# Altium footprint library Footprint-Lib-PhilsLab.PcbLib: 544 footprints (part 19 of 34)
Each footprint in its own frame and in the unit in brackets; x right, y up, seen from the top. Pads: shape width x height; smd on the part's side, far side on the other; paste and mask are expansions set on the pad; w line width, h text height; cw(c..) or ccw(c..) is an arc to the next point about the centre after c.
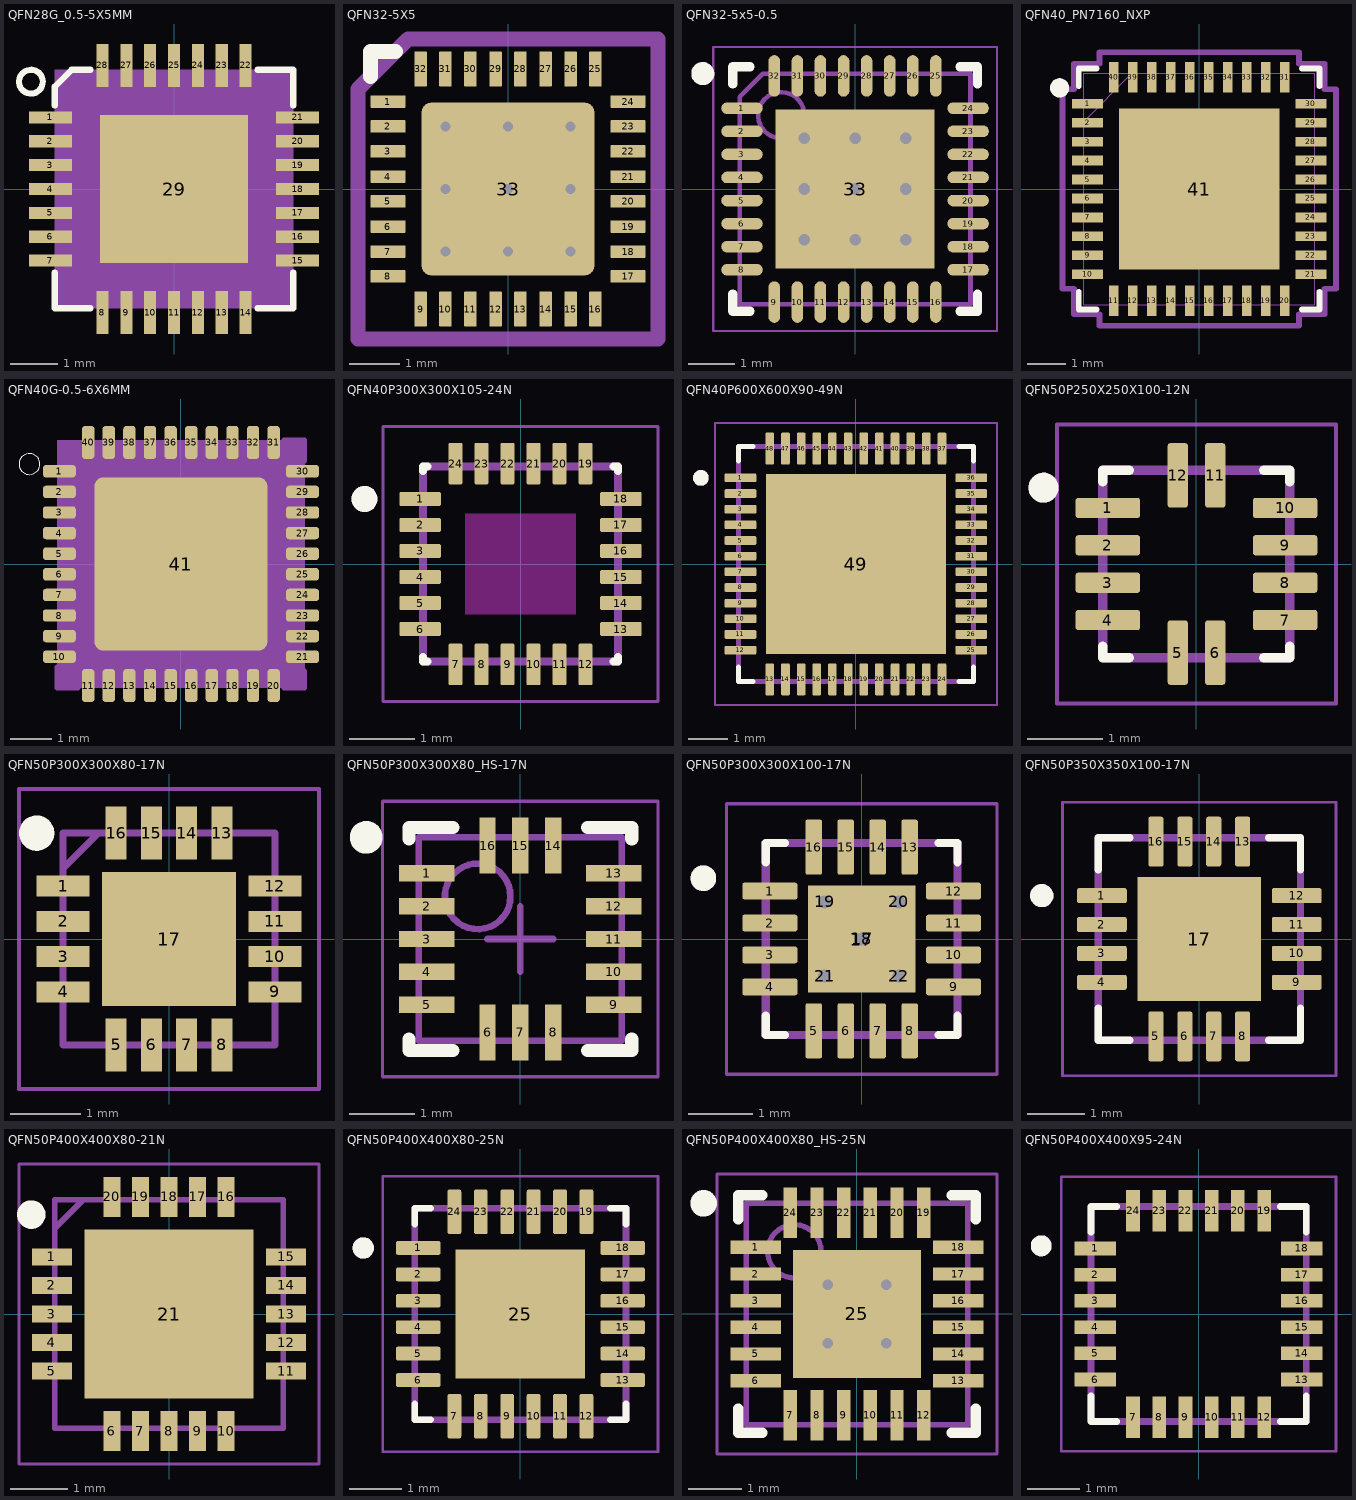
[diagram p18: the footprints below, top view; thin cyan lines are the x and y axes]

## QFN28G_0.5-5X5MM [mm]
pads (29):
  rect 0.9x0.254 smd: 1(-2.59,1.5) 2(-2.59,1) 3(-2.59,0.5) 4(-2.59,0) 5(-2.59,-0.5) 6(-2.59,-1) 7(-2.59,-1.5) 15(2.59,-1.5) 16(2.59,-1) 17(2.59,-0.5) 18(2.59,0) 19(2.59,0.5) 20(2.59,1) 21(2.59,1.5)
  rect 0.254x0.9 smd: 8(-1.5,-2.59) 9(-1,-2.59) 10(-0.5,-2.59) 11(0,-2.59) 12(0.5,-2.59) 13(1,-2.59) 14(1.5,-2.59) 22(1.5,2.59) 23(1,2.59) 24(0.5,2.59) 25(0,2.59) 26(-0.5,2.59) 27(-1,2.59) 28(-1.5,2.59)
  rect 3.1x3.1 smd paste-3: 29(0,0)
Top Overlay:
  circle w0.127: c-3,2.25 r0.25
  lines w0.127: -2.5,-1.75 -2.5,-2.5 -1.75,-2.5 ; -2.5,1.75 -2.5,2.146 -2.146,2.5 -1.75,2.5 ; 1.75,-2.5 2.5,-2.5 2.5,-1.75 ; 1.75,2.5 2.5,2.5 2.5,1.75
Top Paste:
  region: 1.5,-1.5 0.25,-1.5 0.25,-0.25 1.5,-0.25
  region: -0.25,-1.503 -1.503,-1.503 -1.503,-0.25 -0.25,-0.25
  region: 1.5,0.25 0.25,0.25 0.25,1.5 1.5,1.5
  region: -0.25,0.25 -1.503,0.25 -1.503,1.5 -0.25,1.5
Mechanical 15:
  region: 2.5,-2.501 -2.501,-2.501 -2.501,2.5 2.5,2.5

## QFN32-5X5 [mm]
pads (33):
  rrect10% 0.7x0.25 smd mask+0.05: 1(-2.4,1.75) 2(-2.4,1.25) 3(-2.4,0.75) 4(-2.4,0.25) 5(-2.4,-0.25) 6(-2.4,-0.75) 7(-2.4,-1.25) 8(-2.4,-1.75) 17(2.4,-1.75) 18(2.4,-1.25) 19(2.4,-0.75) 20(2.4,-0.25) 21(2.4,0.25) 22(2.4,0.75) 23(2.4,1.25) 24(2.4,1.75)
  rrect10% 0.25x0.7 smd mask+0.05: 9(-1.75,-2.4) 10(-1.25,-2.4) 11(-0.75,-2.4) 12(-0.25,-2.4) 13(0.25,-2.4) 14(0.75,-2.4) 15(1.25,-2.4) 16(1.75,-2.4) 25(1.75,2.4) 26(1.25,2.4) 27(0.75,2.4) 28(0.25,2.4) 29(-0.25,2.4) 30(-0.75,2.4) 31(-1.25,2.4) 32(-1.75,2.4)
  rrect10% 3.45x3.45 smd mask+0.07: 33(0,0)
via 0,0 diameter 0.65 hole 0.2
via 0,1.25 diameter 0.65 hole 0.2
via 0,-1.25 diameter 0.65 hole 0.2
via -1.25,-1.25 diameter 0.65 hole 0.2
via -1.25,0 diameter 0.65 hole 0.2
via -1.25,1.25 diameter 0.65 hole 0.2
via 1.25,1.25 diameter 0.65 hole 0.2
via 1.25,0 diameter 0.65 hole 0.2
via 1.25,-1.25 diameter 0.65 hole 0.2
Top Overlay:
  lines w0.3: -2.75,2.25 -2.75,2.75 -2.25,2.75
Mechanical 13:
  lines w0.3: -3,-3 -3,-1.75 -3,2 -2,3 3,3 3,-3 -3,-3
  text "'.Designator'" at -5.84,-0.925 h1
3D body "QFN32-5x5.step": height 0.85, standoff 0, extent -2.5,-2.5 2.5,2.5

## QFN32-5x5-0.5 [mm]
height 1
pads (33):
  oval 0.9x0.25 smd mask+0.05: 1(-2.45,1.75) 2(-2.45,1.25) 3(-2.45,0.75) 4(-2.45,0.25) 5(-2.45,-0.25) 6(-2.45,-0.75) 7(-2.45,-1.25) 8(-2.45,-1.75) 17(2.45,-1.75) 18(2.45,-1.25) 19(2.45,-0.75) 20(2.45,-0.25) 21(2.45,0.25) 22(2.45,0.75) 23(2.45,1.25) 24(2.45,1.75)
  oval 0.25x0.9 smd mask+0.05: 9(-1.75,-2.45) 10(-1.25,-2.45) 11(-0.75,-2.45) 12(-0.25,-2.45) 13(0.25,-2.45) 14(0.75,-2.45) 15(1.25,-2.45) 16(1.75,-2.45) 25(1.75,2.45) 26(1.25,2.45) 27(0.75,2.45) 28(0.25,2.45) 29(-0.25,2.45) 30(-0.75,2.45) 31(-1.25,2.45) 32(-1.75,2.45)
  rect 3.45x3.45 smd mask+0.05: 33(0,0)
via -1.1,1.1 diameter 0.6 hole 0.25
via 0,1.1 diameter 0.6 hole 0.25
via 1.1,1.1 diameter 0.6 hole 0.25
via -1.1,0 diameter 0.6 hole 0.25
via 0,0 diameter 0.6 hole 0.25
via 1.1,0 diameter 0.6 hole 0.25
via -1.1,-1.1 diameter 0.6 hole 0.25
via 0,-1.1 diameter 0.6 hole 0.25
via 1.1,-1.1 diameter 0.6 hole 0.25
Top Overlay:
  circle w0.25: c-3.3,2.5 r0.125
  lines w0.2: -2.65,-2.275 -2.65,-2.65 -2.275,-2.65 ; -2.65,2.275 -2.65,2.65 -2.275,2.65 ; 2.275,-2.65 2.65,-2.65 2.65,-2.275 ; 2.275,2.65 2.65,2.65 2.65,2.275
Mechanical 13:
  circle w0.1: c-1.6,1.6 r0.5
  lines w0.1: -2.5,-2.5 -2.5,2 -2,2.5 2.5,2.5 2.5,-2.5 -2.5,-2.5
  text "'.Designator'" at -6.315,-1.4 h1
Mechanical 15:
  lines w0.05: -3.075,-3.075 -3.075,3.075 3.075,3.075 3.075,-3.075 -3.075,-3.075
  lines w0.1: -0.5,0 0.5,0 ; 0,-0.5 0,0.5
3D body "QFN32-5x5-0.5.step": height 1, standoff 0, extent -2.501,-2.501 2.501,2.501

## QFN40_PN7160_NXP [mil]
pads (41):
  rect 32x10 smd paste+0 mask+0: 1(-116,88.61) 2(-116,68.92) 3(-116,49.23) 4(-116,29.54) 5(-116,9.85) 6(-116,-9.85) 7(-116,-29.54) 8(-116,-49.23) 9(-116,-68.92) 10(-116,-88.61) 21(116,-88.61) 22(116,-68.92) 23(116,-49.23) 24(116,-29.54) 25(116,-9.85) 26(116,9.85) 27(116,29.54) 28(116,49.23) 29(116,68.92) 30(116,88.61)
  rect 10x32 smd paste+0 mask+0: 11(-88.61,-116) 12(-68.92,-116) 13(-49.23,-116) 14(-29.54,-116) 15(-9.85,-116) 16(9.85,-116) 17(29.54,-116) 18(49.23,-116) 19(68.92,-116) 20(88.61,-116) 31(88.61,116) 32(68.92,116) 33(49.23,116) 34(29.54,116) 35(9.85,116) 36(-9.85,116) 37(-29.54,116) 38(-49.23,116) 39(-68.92,116) 40(-88.61,116)
  rect 167x167 smd paste-83.5 mask+0: 41(0,0)
Top Overlay:
  circle w10: c-145,105 r5
  lines w6: -125,-106.7 -125,-125 -106.7,-125 ; -125,106.7 -125,125 -106.7,125 ; 106.7,-125 125,-125 125,-106.7 ; 106.7,125 125,125 125,106.7
Top Paste:
  region: -31.77,79.56 -79.56,79.56 -79.56,31.77 -31.77,31.77
  region: -31.77,23.9 -79.56,23.9 -79.56,-23.9 -31.77,-23.9
  region: -31.77,-31.77 -79.56,-31.77 -79.56,-79.56 -31.77,-79.56
  region: 23.9,79.56 -23.9,79.56 -23.9,31.77 23.9,31.77
  region: 23.9,23.9 -23.9,23.9 -23.9,-23.9 23.9,-23.9
  region: 23.9,-31.77 -23.9,-31.77 -23.9,-79.56 23.9,-79.56
  region: 79.56,79.56 31.77,79.56 31.77,31.77 79.56,31.77
  region: 79.56,23.9 31.77,23.9 31.77,-23.9 79.56,-23.9
  region: 79.56,-31.77 31.77,-31.77 31.77,-79.56 79.56,-79.56
Mechanical 13:
  lines w1: -120,70 -70,120 ; -120,-120 120,-120 120,120 -120,120 -120,-120 ; -120,-94.61 -120,-82.61 -120,-94.61 ; -120,-74.92 -120,-62.91 -120,-74.92 ; -120,-55.23 -120,-43.23 -120,-55.23 ; -120,-35.53 -120,-23.54 -120,-35.53 ; -120,-15.85 -120,-3.85 -120,-15.85 ; -120,3.85 -120,15.85 -120,3.85 ; -120,23.54 -120,35.53 -120,23.54 ; -120,43.23 -120,55.23 -120,43.23 ; -120,62.91 -120,74.92 -120,62.91 ; -120,82.61 -120,94.61 -120,82.61 ; -94.61,-120 -82.61,-120 -94.61,-120 ; -94.61,120 -82.61,120 -94.61,120 ; -74.92,-120 -62.91,-120 -74.92,-120 ; -74.92,120 -62.91,120 -74.92,120 ; -55.23,-120 -43.23,-120 -55.23,-120 ; -55.23,120 -43.23,120 -55.23,120 ; -35.53,-120 -23.54,-120 -35.53,-120 ; -35.53,120 -23.54,120 -35.53,120 ; -15.85,-120 -3.85,-120 -15.85,-120 ; -15.85,120 -3.85,120 -15.85,120 ; 3.85,-120 15.85,-120 3.85,-120 ; 3.85,120 15.85,120 3.85,120 ; 23.54,-120 35.53,-120 23.54,-120 ; 23.54,120 35.53,120 23.54,120 ; 43.23,-120 55.23,-120 43.23,-120 ; 43.23,120 55.23,120 43.23,120 ; 62.91,-120 74.92,-120 62.91,-120 ; 62.91,120 74.92,120 62.91,120 ; 82.61,-120 94.61,-120 82.61,-120 ; 82.61,120 94.61,120 82.61,120 ; 120,-94.61 120,-82.61 120,-94.61 ; 120,-74.92 120,-62.91 120,-74.92 ; 120,-55.23 120,-43.23 120,-55.23 ; 120,-35.53 120,-23.54 120,-35.53 ; 120,-15.85 120,-3.85 120,-15.85 ; 120,3.85 120,15.85 120,3.85 ; 120,23.54 120,35.53 120,23.54 ; 120,43.23 120,55.23 120,43.23 ; 120,62.91 120,74.92 120,62.91 ; 120,82.61 120,94.61 120,82.61
  text "*" at -112.5,73.45 h50
Mechanical 15:
  lines w6: -142,-103.61 -130,-103.61 -130,-130 -103.61,-130 -103.61,-142 103.61,-142 103.61,-130 130,-130 130,-103.61 142,-103.61 142,103.61 130,103.61 130,130 103.61,130 103.61,142 -103.61,142 -103.61,130 -130,130 -130,103.61 -142,103.61 -142,-103.61
3D body "QFN40_PN7160_NXP.step": height 39.09, standoff 0, extent -120,-120 120,120

## QFN40G-0.5-6X6MM [mm]
pads (41):
  rrect50% 0.8x0.3 smd: 1(-2.95,2.25) 2(-2.95,1.75) 3(-2.95,1.25) 4(-2.95,0.75) 5(-2.95,0.25) 6(-2.95,-0.25) 7(-2.95,-0.75) 8(-2.95,-1.25) 9(-2.95,-1.75) 10(-2.95,-2.25) 21(2.95,-2.25) 22(2.95,-1.75) 23(2.95,-1.25) 24(2.95,-0.75) 25(2.95,-0.25) 26(2.95,0.25) 27(2.95,0.75) 28(2.95,1.25) 29(2.95,1.75) 30(2.95,2.25)
  rrect50% 0.3x0.8 smd: 11(-2.25,-2.95) 12(-1.75,-2.95) 13(-1.25,-2.95) 14(-0.75,-2.95) 15(-0.25,-2.95) 16(0.25,-2.95) 17(0.75,-2.95) 18(1.25,-2.95) 19(1.75,-2.95) 20(2.25,-2.95) 31(2.25,2.95) 32(1.75,2.95) 33(1.25,2.95) 34(0.75,2.95) 35(0.25,2.95) 36(-0.25,2.95) 37(-0.75,2.95) 38(-1.25,2.95) 39(-1.75,2.95) 40(-2.25,2.95)
  rrect10% 4.2x4.2 smd: 41(0,0)
Top Overlay:
  circle w0: c-3.675,2.425 r0.254
Mechanical 13:
  lines w0.127: -3,-2.5 -3,-3 -2.5,-3 ; 2.5,-3 3,-3 3,-2.6 ; 2.5,3 3,3 3,2.5
Mechanical 15:
  region: 3,-3 -3,-3 -3,3 3,3
3D body "step_temp.STEP": height 1, standoff 0, extent -3,-3 3,3

## QFN40P300X300X105-24N [mm]
height 1.05
pads (24):
  rrect25% 0.64x0.22 smd: 1(-1.545,1) 2(-1.545,0.6) 3(-1.545,0.2) 4(-1.545,-0.2) 5(-1.545,-0.6) 6(-1.545,-1) 13(1.545,-1) 14(1.545,-0.6) 15(1.545,-0.2) 16(1.545,0.2) 17(1.545,0.6) 18(1.545,1)
  rrect25% 0.22x0.64 smd: 7(-1,-1.545) 8(-0.6,-1.545) 9(-0.2,-1.545) 10(0.2,-1.545) 11(0.6,-1.545) 12(1,-1.545) 19(1,1.545) 20(0.6,1.545) 21(0.2,1.545) 22(-0.2,1.545) 23(-0.6,1.545) 24(-1,1.545)
Top Overlay:
  circle w0.2: c-2.4,1 r0.1
  lines w0.127: -1.5,-1.43 -1.5,-1.5 -1.43,-1.5 ; -1.5,1.43 -1.5,1.5 -1.43,1.5 ; 1.43,-1.5 1.5,-1.5 1.5,-1.43 ; 1.43,1.5 1.5,1.5 1.5,1.43
Keep-Out Layer:
  region: 0.85,-0.77 -0.85,-0.77 -0.85,0.77 0.85,0.77
Mechanical 13:
  circle w0.2: c-2.4,1 r0.1
  lines w0.127: -1.5,-1.5 1.5,-1.5 1.5,1.5 -1.5,1.5 -1.5,-1.5
Mechanical 15:
  lines w0.05: -2.115,-2.115 2.115,-2.115 2.115,2.115 -2.115,2.115 -2.115,-2.115
3D body "step_temp.STEP": height 1, standoff -0.05, extent -1.5,-1.5 1.5,1.5

## QFN40P600X600X90-49N [mm]
height 0.9
pads (49):
  rrect25% 0.81x0.22 smd: 1(-2.95,2.2) 2(-2.95,1.8) 3(-2.95,1.4) 4(-2.95,1) 5(-2.95,0.6) 6(-2.95,0.2) 7(-2.95,-0.2) 8(-2.95,-0.6) 9(-2.95,-1) 10(-2.95,-1.4) 11(-2.95,-1.8) 12(-2.95,-2.2) 25(2.95,-2.2) 26(2.95,-1.8) 27(2.95,-1.4) 28(2.95,-1) 29(2.95,-0.6) 30(2.95,-0.2) 31(2.95,0.2) 32(2.95,0.6) 33(2.95,1) 34(2.95,1.4) 35(2.95,1.8) 36(2.95,2.2)
  rrect25% 0.22x0.81 smd: 13(-2.2,-2.95) 14(-1.8,-2.95) 15(-1.4,-2.95) 16(-1,-2.95) 17(-0.6,-2.95) 18(-0.2,-2.95) 19(0.2,-2.95) 20(0.6,-2.95) 21(1,-2.95) 22(1.4,-2.95) 23(1.8,-2.95) 24(2.2,-2.95) 37(2.2,2.95) 38(1.8,2.95) 39(1.4,2.95) 40(1,2.95) 41(0.6,2.95) 42(0.2,2.95) 43(-0.2,2.95) 44(-0.6,2.95) 45(-1,2.95) 46(-1.4,2.95) 47(-1.8,2.95) 48(-2.2,2.95)
  rect 4.6x4.6 smd paste-3: 49(0,0)
Top Overlay:
  circle w0.2: c-3.96,2.2 r0.1
  lines w0.127: -3,-2.63 -3,-3 -2.63,-3 ; -3,2.63 -3,3 -2.63,3 ; 2.63,-3 3,-3 3,-2.63 ; 2.63,3 3,3 3,2.63
Top Paste:
  region: -0.42,0.42 -1.88,0.42 -1.88,1.88 -0.42,1.88
  region: 1.88,0.42 0.42,0.42 0.42,1.88 1.88,1.88
  region: -0.42,-1.88 -1.88,-1.88 -1.88,-0.42 -0.42,-0.42
  region: 1.88,-1.88 0.42,-1.88 0.42,-0.42 1.88,-0.42
Mechanical 13:
  circle w0.2: c-3.96,2.2 r0.1
  lines w0.127: -3,-3 3,-3 3,3 -3,3 -3,-3
Mechanical 15:
  lines w0.05: -3.605,-3.605 3.605,-3.605 3.605,3.605 -3.605,3.605 -3.605,-3.605
3D body "step_temp.STEP": height 0.95, standoff 0, extent -3,-3 3,3

## QFN50P250X250X100-12N [mm]
pads (12):
  rrect25% 0.86x0.27 smd: 1(-1.185,0.75) 2(-1.185,0.25) 3(-1.185,-0.25) 4(-1.185,-0.75) 7(1.185,-0.75) 8(1.185,-0.25) 9(1.185,0.25) 10(1.185,0.75)
  rrect25% 0.27x0.86 smd: 5(-0.25,-1.185) 6(0.25,-1.185) 11(0.25,1.185) 12(-0.25,1.185)
Top Overlay:
  circle w0.2: c-2.045,1.02 r0.1
  lines w0.127: -1.25,-1.1 -1.25,-1.25 -0.9,-1.25 ; -1.25,1.1 -1.25,1.25 -0.9,1.25 ; 0.9,-1.25 1.25,-1.25 1.25,-1.1 ; 0.9,1.25 1.25,1.25 1.25,1.1
Mechanical 13:
  circle w0.2: c-2.045,1.02 r0.1
  lines w0.127: -1.25,-1.25 1.25,-1.25 1.25,1.25 -1.25,1.25 -1.25,-1.25
Mechanical 15:
  lines w0.05: -1.865,-1.865 1.865,-1.865 1.865,1.865 -1.865,1.865 -1.865,-1.865
3D body "TPS63051RMWR--3DModel-STEP-269445.STEP": height 1, standoff 0, extent -1.25,-1.25 1.25,1.25

## QFN50P300X300X80-17N [mm]
pads (17):
  rect 0.75x0.3 smd: 1(-1.5,0.75) 2(-1.5,0.25) 3(-1.5,-0.25) 4(-1.5,-0.75) 9(1.5,-0.75) 10(1.5,-0.25) 11(1.5,0.25) 12(1.5,0.75)
  rect 0.3x0.75 smd: 5(-0.75,-1.5) 6(-0.25,-1.5) 7(0.25,-1.5) 8(0.75,-1.5) 13(0.75,1.5) 14(0.25,1.5) 15(-0.25,1.5) 16(-0.75,1.5)
  rect 1.9x1.9 smd: 17(0,0)
Top Overlay:
  circle w0.25: c-1.875,1.5 r0.125
Mechanical 13:
  lines w0.1: -1.5,1 -1,1.5 ; -1.5,-1.5 -1.5,1.5 1.5,1.5 1.5,-1.5 -1.5,-1.5
  text "'.Designator'" at -6.315,-1.4 h1
Mechanical 15:
  lines w0.05: -2.125,-2.125 -2.125,2.125 2.125,2.125 2.125,-2.125 -2.125,-2.125
3D body "MAX25202SATEA_VY+.stp": height 0.8, standoff 0, extent -1.55,-1.55 1.55,1.55

## QFN50P300X300X80_HS-17N [mm] "QFN, 16-Leads, Body 3.00x3.00mm, Pitch 0.50mm, Thermal Pad 1.00x1.00mm, IPC Medium Density"
height 0.8
pads (16):
  rect 0.85x0.25 smd mask+0.05: 1(-1.425,1) 2(-1.425,0.5) 3(-1.425,0) 4(-1.425,-0.5) 5(-1.425,-1) 9(1.425,-1) 10(1.425,-0.5) 11(1.425,0) 12(1.425,0.5) 13(1.425,1)
  rect 0.25x0.85 smd mask+0.05: 6(-0.5,-1.425) 7(0,-1.425) 8(0.5,-1.425) 14(0.5,1.425) 15(0,1.425) 16(-0.5,1.425)
Top Overlay:
  circle w0.25: c-2.35,1.55 r0.125
  lines w0.2: -1.7,-1.525 -1.7,-1.7 -1.025,-1.7 ; -1.7,1.525 -1.7,1.7 -1.025,1.7 ; 1.025,-1.7 1.7,-1.7 1.7,-1.525 ; 1.025,1.7 1.7,1.7 1.7,1.525
Mechanical 13:
  circle w0.1: c-0.65,0.65 r0.5
  lines w0.1: -1.55,-1.55 1.55,-1.55 1.55,1.55 -1.55,1.55 -1.55,-1.55
  text "'.Designator'" at -5.84,-0.925 h1
Mechanical 15:
  lines w0.05: -2.1,-2.1 2.1,-2.1 2.1,2.1 -2.1,2.1 -2.1,-2.1
  lines w0.1: -0.5,0 0.5,0 ; 0,-0.5 0,0.5
3D body "IAM-20380.STEP": height 0.81, standoff 0.01, extent -1.5,-1.5 1.5,1.5

## QFN50P300X300X100-17N [mm]
pads (22):
  rrect25% 0.86x0.26 smd: 1(-1.435,0.75) 2(-1.435,0.25) 3(-1.435,-0.25) 4(-1.435,-0.75) 9(1.435,-0.75) 10(1.435,-0.25) 11(1.435,0.25) 12(1.435,0.75)
  rrect25% 0.26x0.86 smd: 5(-0.75,-1.435) 6(-0.25,-1.435) 7(0.25,-1.435) 8(0.75,-1.435) 13(0.75,1.435) 14(0.25,1.435) 15(-0.25,1.435) 16(-0.75,1.435)
  rect 1.68x1.68 smd paste-0.31: 17(0,0)
  round 0.4 hole 0.2 mask+0: 18(0,0) 19(-0.58,0.58) 20(0.58,0.58) 21(-0.58,-0.58) 22(0.58,-0.58)
Top Overlay:
  circle w0.2: c-2.475,0.95 r0.1
  lines w0.127: -1.5,-1.2 -1.5,-1.5 -1.2,-1.5 ; -1.5,1.2 -1.5,1.5 -1.2,1.5 ; 1.2,-1.5 1.5,-1.5 1.5,-1.2 ; 1.2,1.5 1.5,1.5 1.5,1.2
Mechanical 13:
  circle w0.2: c-2.475,0.95 r0.1
  lines w0.127: -1.5,-1.5 -1.5,1.5 1.5,1.5 1.5,-1.5 -1.5,-1.5
Mechanical 15:
  lines w0.05: -2.115,-2.115 -2.115,2.115 2.115,2.115 2.115,-2.115 -2.115,-2.115
3D body "step_temp.STEP": height 1, standoff 0, extent -1.5,-1.5 1.5,1.5

## QFN50P350X350X100-17N [mm]
pads (17):
  rrect25% 0.86x0.26 smd: 1(-1.685,0.75) 2(-1.685,0.25) 3(-1.685,-0.25) 4(-1.685,-0.75) 9(1.685,-0.75) 10(1.685,-0.25) 11(1.685,0.25) 12(1.685,0.75)
  rrect25% 0.26x0.86 smd: 5(-0.75,-1.685) 6(-0.25,-1.685) 7(0.25,-1.685) 8(0.75,-1.685) 13(0.75,1.685) 14(0.25,1.685) 15(-0.25,1.685) 16(-0.75,1.685)
  rect 2.14x2.14 smd paste-0.39: 17(0,0)
Top Overlay:
  circle w0.2: c-2.725,0.75 r0.1
  lines w0.127: -1.75,-1.2 -1.75,-1.75 -1.2,-1.75 ; -1.75,1.2 -1.75,1.75 -1.2,1.75 ; 1.2,-1.75 1.75,-1.75 1.75,-1.2 ; 1.2,1.75 1.75,1.75 1.75,1.2
Mechanical 13:
  circle w0.2: c-2.725,0.75 r0.1
  lines w0.127: -1.75,-1.75 -1.75,1.75 1.75,1.75 1.75,-1.75 -1.75,-1.75
Mechanical 15:
  lines w0.05: -2.365,-2.365 -2.365,2.365 2.365,2.365 2.365,-2.365 -2.365,-2.365
3D body "step_temp.STEP": height 1, standoff 0, extent -1.75,-1.75 1.75,1.75

## QFN50P400X400X80-21N [mm]
pads (21):
  rect 0.7x0.3 smd mask+0.15: 1(-2.05,1) 2(-2.05,0.5) 3(-2.05,0) 4(-2.05,-0.5) 5(-2.05,-1) 11(2.05,-1) 12(2.05,-0.5) 13(2.05,0) 14(2.05,0.5) 15(2.05,1)
  rect 0.3x0.7 smd mask+0.15: 6(-1,-2.05) 7(-0.5,-2.05) 8(0,-2.05) 9(0.5,-2.05) 10(1,-2.05) 16(1,2.05) 17(0.5,2.05) 18(0,2.05) 19(-0.5,2.05) 20(-1,2.05)
  rect 2.95x2.95 smd mask+0.15: 21(0,0)
Top Overlay:
  circle w0.25: c-2.409,1.739 r0.125
Mechanical 13:
  lines w0.1: -2,1.5 -1.5,2 ; -2,-2 2,-2 2,2 -2,2 -2,-2
  text "'.Designator'" at -6.315,-1.4 h1
Mechanical 15:
  lines w0.05: -2.625,-2.625 2.625,-2.625 2.625,2.625 -2.625,2.625 -2.625,-2.625
3D body "MAX17633BATP+.stp": height 0.8, standoff 0, extent -2.05,-2.05 2.05,2.05

## QFN50P400X400X80-25N [mm]
pads (25):
  rrect25% 0.84x0.26 smd: 1(-1.935,1.25) 2(-1.935,0.75) 3(-1.935,0.25) 4(-1.935,-0.25) 5(-1.935,-0.75) 6(-1.935,-1.25) 13(1.935,-1.25) 14(1.935,-0.75) 15(1.935,-0.25) 16(1.935,0.25) 17(1.935,0.75) 18(1.935,1.25)
  rrect25% 0.26x0.84 smd: 7(-1.25,-1.935) 8(-0.75,-1.935) 9(-0.25,-1.935) 10(0.25,-1.935) 11(0.75,-1.935) 12(1.25,-1.935) 19(1.25,1.935) 20(0.75,1.935) 21(0.25,1.935) 22(-0.25,1.935) 23(-0.75,1.935) 24(-1.25,1.935)
  rect 2.45x2.45 smd paste-2: 25(0,0)
Top Overlay:
  circle w0.2: c-2.975,1.25 r0.1
  lines w0.127: -2,-1.7 -2,-2 -1.7,-2 ; -2,1.7 -2,2 -1.7,2 ; 1.7,-2 2,-2 2,-1.7 ; 1.7,2 2,2 2,1.7
Top Paste:
  region: 0.77,-0.77 -0.77,-0.77 -0.77,0.77 0.77,0.77
Mechanical 13:
  circle w0.2: c-2.975,1.25 r0.1
  lines w0.127: -2,-2 -2,2 2,2 2,-2 -2,-2
Mechanical 15:
  lines w0.05: -2.605,-2.605 -2.605,2.605 2.605,2.605 2.605,-2.605 -2.605,-2.605
3D body "step_temp.STEP": height 0.8, standoff 0, extent -2,-2 2,2

## QFN50P400X400X80_HS-25N [mm] "QFN, 24-Leads, Body 4.00x4.00mm, Pitch 0.50mm, Thermal Pad 2.50x2.50mm, IPC Medium Density"
height 0.8
pads (25):
  rect 0.95x0.25 smd mask+0.05: 1(-1.9,1.25) 2(-1.9,0.75) 3(-1.9,0.25) 4(-1.9,-0.25) 5(-1.9,-0.75) 6(-1.9,-1.25) 13(1.9,-1.25) 14(1.9,-0.75) 15(1.9,-0.25) 16(1.9,0.25) 17(1.9,0.75) 18(1.9,1.25)
  rect 0.25x0.95 smd mask+0.05: 7(-1.25,-1.9) 8(-0.75,-1.9) 9(-0.25,-1.9) 10(0.25,-1.9) 11(0.75,-1.9) 12(1.25,-1.9) 19(1.25,1.9) 20(0.75,1.9) 21(0.25,1.9) 22(-0.25,1.9) 23(-0.75,1.9) 24(-1.25,1.9)
  rect 2.4x2.4 smd mask+0.07: 25(0,0)
via 0.55,-0.55 diameter 0.5 hole 0.2
via -0.55,-0.55 diameter 0.5 hole 0.2
via 0.55,0.55 diameter 0.5 hole 0.2
via -0.55,0.55 diameter 0.5 hole 0.2
Top Overlay:
  circle w0.25: c-2.875,2.075 r0.125
  lines w0.2: -2.225,-1.775 -2.225,-2.225 -1.775,-2.225 ; -2.225,1.775 -2.225,2.225 -1.775,2.225 ; 1.775,-2.225 2.225,-2.225 2.225,-1.775 ; 1.775,2.225 2.225,2.225 2.225,1.775
Mechanical 13:
  circle w0.1: c-1.175,1.175 r0.5
  lines w0.1: -2.075,-2.075 2.075,-2.075 2.075,2.075 -2.075,2.075 -2.075,-2.075
  text "'.Designator'" at -5.84,-0.925 h1
Mechanical 15:
  lines w0.05: -2.625,-2.625 2.625,-2.625 2.625,2.625 -2.625,2.625 -2.625,-2.625
  lines w0.1: -0.5,0 0.5,0 ; 0,-0.5 0,0.5
3D body "QFN50P400X400X80_HS-25N.step": height 0.8, standoff 0, extent -2.125,-2.125 2.125,2.125

## QFN50P400X400X95-24N [mm]
pads (24):
  rect 0.79x0.26 smd: 1(-1.97,1.25) 2(-1.97,0.75) 3(-1.97,0.25) 4(-1.97,-0.25) 5(-1.97,-0.75) 6(-1.97,-1.25) 13(1.97,-1.25) 14(1.97,-0.75) 15(1.97,-0.25) 16(1.97,0.25) 17(1.97,0.75) 18(1.97,1.25)
  rect 0.26x0.79 smd: 7(-1.25,-1.97) 8(-0.75,-1.97) 9(-0.25,-1.97) 10(0.25,-1.97) 11(0.75,-1.97) 12(1.25,-1.97) 19(1.25,1.97) 20(0.75,1.97) 21(0.25,1.97) 22(-0.25,1.97) 23(-0.75,1.97) 24(-1.25,1.97)
Top Overlay:
  circle w0.2: c-3,1.3 r0.1
  lines w0.127: -2.05,-1.56 -2.05,-2.05 -1.56,-2.05 ; -2.05,1.56 -2.05,2.05 -1.56,2.05 ; 1.56,-2.05 2.05,-2.05 2.05,-1.56 ; 1.56,2.05 2.05,2.05 2.05,1.56
Mechanical 13:
  lines w0.127: -2.05,-2.05 2.05,-2.05 2.05,2.05 -2.05,2.05 -2.05,-2.05
Mechanical 15:
  lines w0.05: -2.62,-2.62 2.62,-2.62 2.62,2.62 -2.62,2.62 -2.62,-2.62
3D body "step_temp.STEP": height 0.93, standoff -0.02, extent -2,-2 2,2